# Altium schematic symbol library LM393DT.SchLib: 1 symbol
Pins are listed as number, name and electrical type; pins without a type are passive.

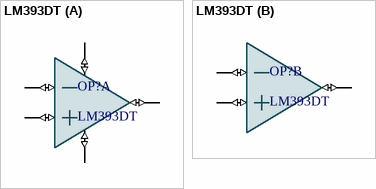
[diagram p0: symbol LM393DT]

## LM393DT
designator OP?
Comparator General Purpose CMOS, DTL, ECL, MOS, Open-Collector, TTL 8-SOIC; MF: STMicroelectronics; Package: SOIC-8 STMicroelectronics; SnapEDA_Link: https://www.snapeda.com/parts/LM393DT/STMicroelectronics/view-part/?ref=snap; MP: LM393DT; Availability: In Stock; Price: None; Value: *; Check_prices: https://www.snapeda.com/parts/LM393DT/STMicroelectronics/view-part/?ref=eda; Purchase-URL: https://pricing.snapeda.com/search/part/LM393DT/?ref=eda
footprint LM393DT
part A pins: 1 OUT (io), 2 NEG (io), 3 POS (io), 4 GND (io), 8 VCC (io)
part B pins: 5 POS (io), 6 NEG (io), 7 OUT (io)